# Altium footprint library RBM_ALTIUM_PCB_LIBRARY.PcbLib: 107 footprints (part 5 of 7)
Each footprint in its own frame and in the unit in brackets; x right, y up, seen from the top. Pads: shape width x height; smd on the part's side, far side on the other; paste and mask are expansions set on the pad; w line width, h text height; cw(c..) or ccw(c..) is an arc to the next point about the centre after c.
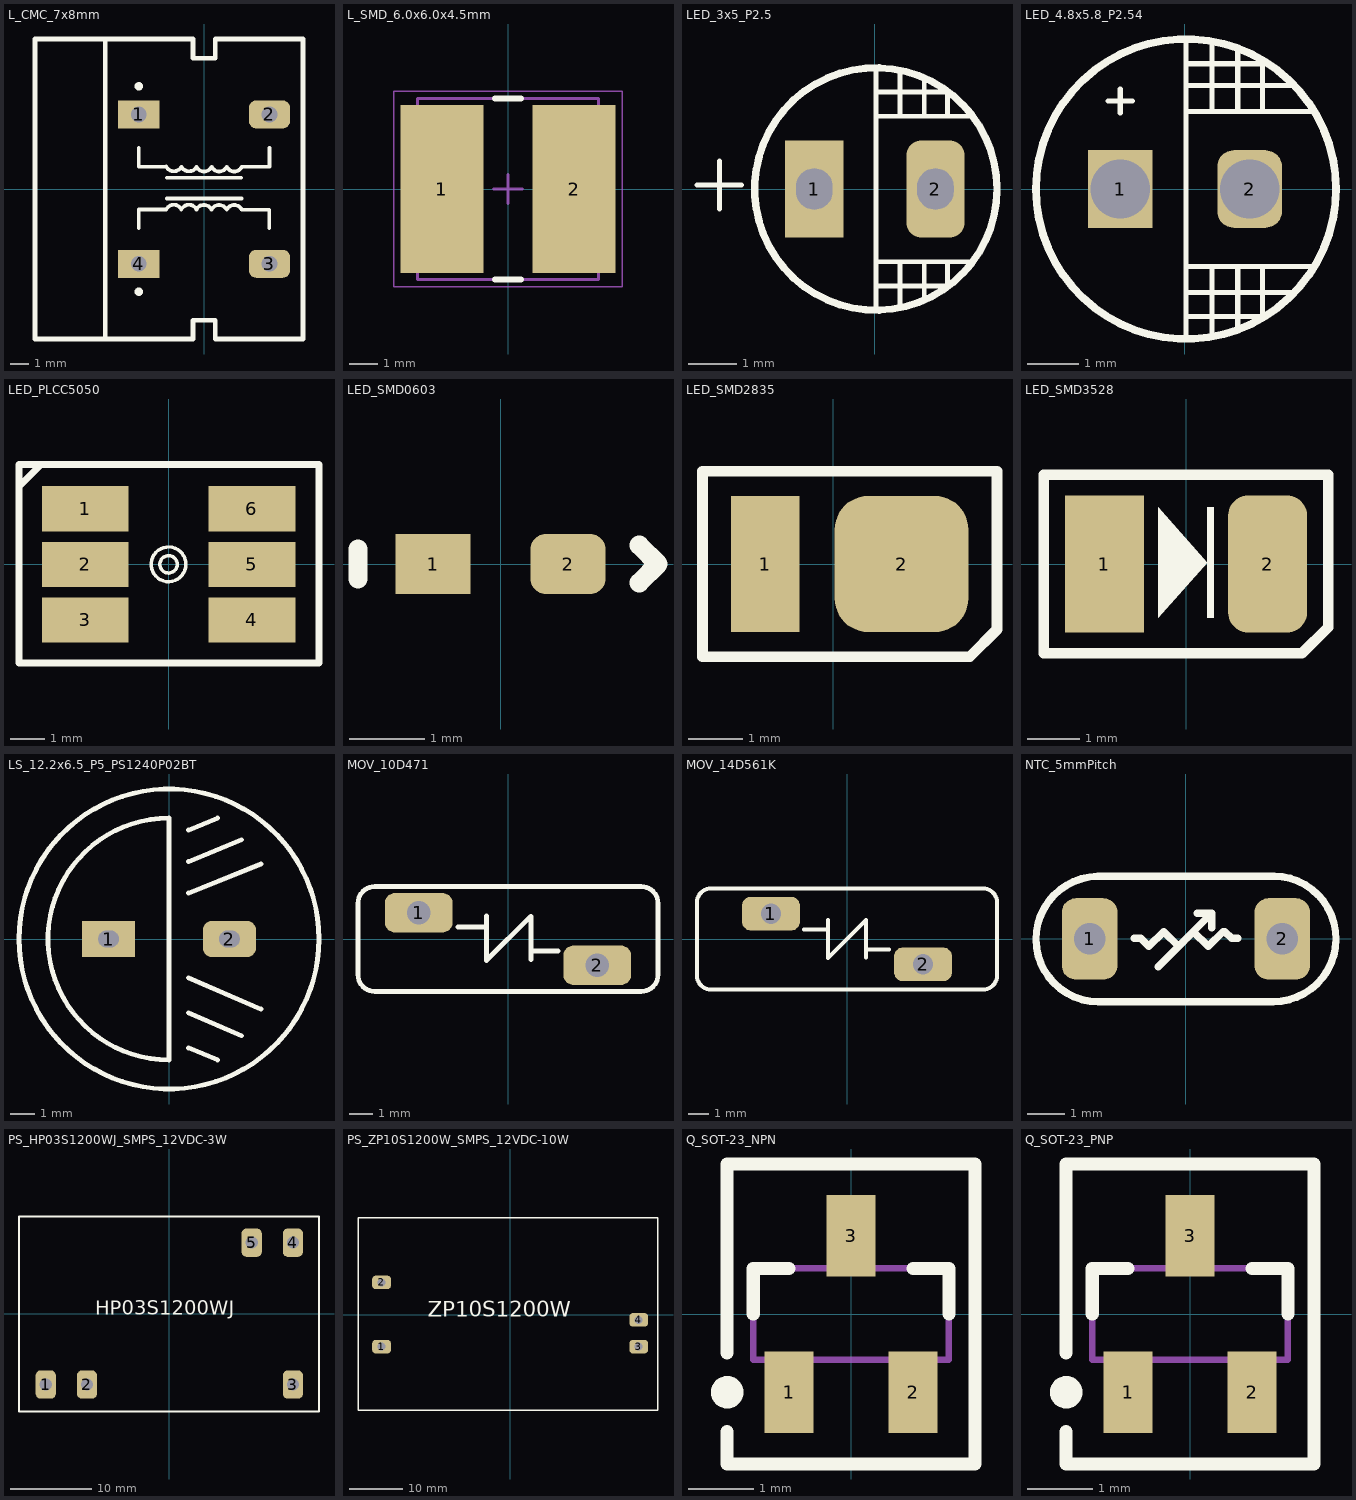
[diagram p4: the footprints below, top view; thin cyan lines are the x and y axes]

## L_CMC_7x8mm [mm] "UU9.8"
pads (4):
  rect 2.2x1.5 hole 0.85: 1(-3.501,3.996) 4(-3.501,-4.004)
  rrect50% 2.2x1.5 hole 0.85: 2(3.499,3.996) 3(3.499,-4.004)
Top Overlay:
  lines w0.2: -3.501,-2.104 -3.501,-1.096 -2.026,-1.096 cw(c-1.622,-1.293) -1.218,-1.099 cw(c-0.814,-1.296) -0.409,-1.101 cw(c-0.006,-1.298) 0.399,-1.104 cw(c0.803,-1.3) 1.208,-1.106 cw(c1.611,-1.303) 2.016,-1.109 3.487,-1.109 3.487,-2.104 ; -3.501,2.196 -3.501,1.189 -2.035,1.189 -2.022,1.201 ccw(c-1.618,1.395) -1.214,1.199 ccw(c-0.809,1.393) -0.406,1.196 ccw(c-0.001,1.391) 0.403,1.194 ccw(c0.808,1.388) 1.211,1.191 ccw(c1.616,1.386) 2.02,1.189 3.487,1.189 3.499,1.201 3.499,2.196 ; -2.006,0.596 1.994,0.596 ; -2.001,-0.504 1.999,-0.504
  lines w0.254: -5.3,-8 -5.3,8 ; -3.401,-5.516 cw(c-3.5,-5.5) -3.4,-5.5 ; -3.401,5.484 cw(c-3.5,5.5) -3.4,5.5 ; -9.06,-8.033 -9.06,8.033 -0.6,8.033 -0.6,7 0.598,7 0.598,8.033 5.3,8.033 5.3,-8.033 0.598,-8.033 0.598,-7.033 -0.6,-7.033 -0.6,-8.033 -9.06,-8.033
3D body "User Library-UF9_8_H-1.step": height 12, standoff -2.5, extent -9.06,-8.033 5.3,8.033

## L_SMD_6.0x6.0x4.5mm [mm] "YNR6045-102M;  1mH ±20% 300mA 4.5O SMD,6.0x6.0x4.5mm Power Inductors RoHS"
height 4.5
pads (2):
  rect 2.9x5.85 smd: 1(-2.3,0) 2(2.3,0)
Top Overlay:
  lines w0.2: -0.45,-3.15 0.45,-3.15 ; -0.45,3.15 0.45,3.15
Assembly Top:
  lines w0.1: -3.15,-3.15 -3.15,3.15 3.15,3.15 3.15,-3.15 -3.15,-3.15
Courtyard Top:
  lines w0.05: -3.975,-3.4 -3.975,3.4 3.975,3.4 3.975,-3.4 -3.975,-3.4
  lines w0.1: -0.5,0 0.5,0 ; 0,-0.5 0,0.5
3D body "INDP6060X45N.step": height 4.6, standoff 0, extent -3.1,-3 3.1,3

## LED_3x5_P2.5 [mm]
pads (2):
  rect 1.2x2 hole 0.85 slot 0.75 at 0 deg: 1(-1.25,0)
  rrect50% 1.2x2 hole 0.85 slot 0.75 at 0 deg: 2(1.25,0)
Top Overlay:
  circle w0.15: c0.02,0 r2.5
  lines w0.1: -3.67,0.083 -2.754,0.083 ; -3.203,-0.417 -3.203,0.583 ; 0.02,-2.5 0.02,2.5 ; 0.02,-2 1.5,-2 1.5,-1.5 ; 0.02,-1.5 2.014,-1.5 ; 0.02,1.5 2.014,1.5 ; 0.02,2 1.5,2 1.5,1.5 ; 0.52,-2.4 0.52,-1.5 ; 0.52,1.5 0.52,2.4 ; 1.02,-2.3 1.02,-1.5 ; 1.02,1.5 1.02,2.3
3D body "LED_3x5_P2.5.STEP": height 7.38, standoff -1.17, extent -1.974,-1.498 2.014,1.994

## LED_4.8x5.8_P2.54 [mm] "HL-798H256WC-MD"
pads (2):
  rect 1.25x1.5 / inner rect 1.5x2.2 / far side rect 1.5x2.2 hole 1.15: 1(-1.25,0)
  rrect50% 1.25x1.5 / inner rrect50% 1.5x2.2 / far side rrect50% 1.5x2.2 hole 1.15: 2(1.25,0)
Top Overlay:
  circle w0.15: c0.02,0 r2.9
  lines w0.1: -1.484,1.7 -1.017,1.7 ; -1.25,1.466 -1.25,1.934 ; 0.02,-2.9 0.02,2.9 ; 0.02,-2 2.1,-2 ; 0.02,-1.5 2.503,-1.5 ; 0.02,1.5 2.502,1.5 ; 0.02,2 2.126,2 ; 0.02,2.423 1.5,2.423 ; 0.039,-2.465 1.5,-2.465 ; 0.52,-2.857 0.52,-1.5 ; 0.52,1.5 0.52,2.857 ; 1.02,-2.722 1.02,-1.5 ; 1.02,1.5 1.02,2.722 ; 1.5,-2.494 1.5,-1.5 ; 1.5,1.5 1.5,2.5
3D body: height 4.8, standoff 0, extent -2.38,-2.4 2.42,2.4
3D body: height 1.5, standoff 0, extent -2.88,-2.897 2.92,2.897
3D body: height 2, standoff 1, extent -1.98,-2 2.02,2
3D body: height 1, standoff -1.5, extent -1.746,-0.499 -0.75,0.499
3D body: height 1, standoff -1.5, extent 0.754,-0.499 1.75,0.499

## LED_PLCC5050 [mm] "EDISON RGB .2W"
pads (6):
  rect 2.5x1.3 smd: 1(-2.4,1.6) 2(-2.4,0) 3(-2.4,-1.6) 4(2.4,-1.6) 5(2.4,0) 6(2.4,1.6)
Top Overlay:
  circle w0.1: c0,0 r0.5
  circle w0.1: c0,0 r0.25
  lines w0.2: -4.305,2.235 -3.67,2.87 ; -4.305,-2.845 4.331,-2.845 4.331,2.87 -4.305,2.87 -4.305,-2.845
3D body "User Library-APA102C.step": height 1.51, standoff -0.04, extent -2.75,-2.5 2.75,2.5

## LED_SMD0603 [mm]
pads (2):
  rect 1x0.8 smd: 1(-0.9,0)
  rrect50% 1x0.8 smd: 2(0.9,0)
Top Overlay:
  lines w0.254: -1.9,-0.2 -1.9,0.2 ; 1.85,-0.25 2.1,0 1.85,0.25
3D body "ALSRobot-LED0603(R).step": height 0.6, standoff 0, extent -0.81,-0.4 0.81,0.4

## LED_SMD2835 [mm]
pads (2):
  rect 1.25x2.5 smd: 1(-1.25,0)
  rrect50% 2.45x2.5 smd: 2(1.25,0)
Top Overlay:
  lines w0.2: -2.4,-1.7 2.5,-1.7 3,-1.2 3,1.7 -2.4,1.7 -2.4,-1.7
3D body "LED_SMD-2835.STEP": height 0.7, standoff -0.02, extent -1.547,-1.4 2.017,1.4

## LED_SMD3528 [mm]
pads (2):
  rect 1.5x2.6 smd: 1(-1.55,0)
  rrect50% 1.5x2.6 smd: 2(1.55,0)
Top Overlay:
  region: 0.525,1.075 0.4,1.075 0.4,-1.025 0.525,-1.025
  region: -0.525,-1.025 -0.525,1.075 0.4,0.025
  region: 2.5,1.6
  lines w0.2: -2.7,-1.7 -2.7,1.7 2.7,1.7 2.7,-1.2 2.2,-1.7 -2.7,-1.7
3D body "LED_Osram_Led_PLCC4-2.step": height 1.95, standoff 0, extent -1.8,-1.4 1.7,1.4

## LS_12.2x6.5_P5_PS1240P02BT [mm] "PS1240P02BT, ø12.2x6.5 P5 70dB 4kHz 3~30V"
pads (2):
  rect 2.2x1.5 hole 0.7 slot 0.85 at 0 deg: 1(-2.5,0)
  rrect50% 2.2x1.5 hole 0.7 slot 0.85 at 0 deg: 2(2.5,0)
Top Overlay:
  circle w0.2: c0,0 r6.2
  lines w0.2: 0.8,-4.5 2,-5 ; 0.8,-3.046 3,-4 ; 0.8,-1.6 3.8,-2.9 ; 0.8,1.9 3.8,3.1 ; 0.8,3.2 3,4.1 ; 0.8,4.5 2,5 ; 0,-5 cw(c0,0) 0,5 0,-5
3D body: height 6.75, standoff 0.25, extent -6.1,-6.097 6.1,6.097
3D body: height 1, standoff -1, extent -2.829,-0.329 -2.171,0.329
3D body: height 1, standoff -1, extent 2.173,-0.329 2.83,0.33
3D body: height 6.8, standoff 0.3, extent -1.494,-1.497 1.494,1.497

## MOV_10D471 [mm]
pads (2):
  rrect50% 2.85x1.65 hole 1: 1(-3.75,1.1) 2(3.75,-1.1)
Top Overlay:
  lines w0.1: 0.998,-0.51 1.009,-0.5
  lines w0.2: -5.1,2.2 5.6,2.2 cw(c5.6,1.5) 6.3,1.5 6.3,-1.5 cw(c5.6,-1.5) 5.6,-2.2 -5.6,-2.2 cw(c-5.6,-1.5) -6.3,-1.5 -6.3,1.5 cw(c-5.6,1.5) -5.6,2.2 -4.9,2.2 ; -2.1,0.499 -0.921,0.499 ; -0.908,0.967 -0.908,-0.903 0.954,0.959 ; 0.967,-0.875 0.967,0.959 ; 1.009,-0.5 2.1,-0.5
3D body "User Library-S10K275.STEP": height 13.55, standoff -1.95, extent -6,-1.9 6,1.901
3D body: height 3, standoff -2, extent -4.158,0.691 -3.342,1.509
3D body: height 3, standoff -2, extent 3.343,-1.509 4.16,-0.691

## MOV_14D561K [mm]
pads (2):
  rrect50% 2.85x1.65 hole 1: 1(-3.75,1.25) 2(3.75,-1.25)
Top Overlay:
  lines w0.1: 0.975,-0.539 0.985,-0.528
  lines w0.2: -2.123,0.471 -0.945,0.471 ; -0.931,0.939 -0.931,-0.931 0.931,0.931 ; 0.944,-0.903 0.944,0.931 ; 0.985,-0.528 2.077,-0.528 ; -7.4,-1.8 ccw(c-6.7,-1.8) -6.7,-2.5 6.7,-2.5 ccw(c6.7,-1.8) 7.4,-1.8 7.4,1.8 ccw(c6.7,1.8) 6.7,2.5 -6.7,2.5 ccw(c-6.7,1.8) -7.4,1.8 -7.4,-1.8
3D body "Varistor_14D561K.STEP": height 17.4, standoff -1.5, extent -7.4,-2.175 7.4,2.175

## NTC_5mmPitch [mm]
pads (2):
  rrect50% 1.5x2.2 hole 0.85: 1(-2.6,0) 2(2.6,0)
Top Overlay:
  lines w0.1: -1.229,0.018 -1.218,0.018 ; 1,0.2 1.049,0.2 ; -0.6,0.2 -0.6,0.2 ; 0.6,-0.2 0.6,-0.2
  lines w0.2: -2.384,1.691 ccw(c-2.353,-0.005) -2.371,-1.7 ; -2.384,1.692 2.38,1.692 ; -2.353,-1.694 2.355,-1.694 ; -1.4,0.018 -1.229,0.018 ; -1.218,0.018 -1,-0.2 -0.6,0.2 -0.2,-0.2 0.2,0.2 0.6,-0.2 1,0.2 ; -0.75,-0.75 0.7,0.7 ; 0.3,0.7 0.7,0.7 ; 0.7,0.3 0.7,0.7 ; 1.049,0.2 1.232,0.018 1.4,0.018 ; 2.347,-1.694 ccw(c2.355,0.002) 2.38,1.698
3D body: height 2, standoff -1, extent -2.874,-0.274 -2.326,0.274
3D body: height 2, standoff -1, extent 2.327,-0.274 2.875,0.275
3D body: height 6.75, standoff 1.25, extent -2.752,-1.638 2.748,1.692
3D body: height 4, standoff 1, extent -2.9,-0.3 -2.302,0.299
3D body: height 4, standoff 1, extent 2.302,-0.299 2.9,0.3

## PS_HP03S1200WJ_SMPS_12VDC-3W [mm]
pads (5):
  rrect50% 2.5x3.5 hole 1.5: 1(-15.24,-8.75) 2(-10.16,-8.75) 3(15.24,-8.75) 4(15.24,8.75) 5(10.16,8.75)
Top Overlay:
  lines w0.254: -18.54,-12.05 -18.54,11.95 18.46,11.95 18.46,-12.05 -18.54,-12.05
  text "HP03S1200WJ" at -9.14,-0.75 h3
Bottom Overlay:
  lines w0.254: -18.54,-12.05 -18.54,11.95 18.46,11.95 18.46,-12.05 -18.54,-12.05
  text "G" at 16.31,4.1 h3
  text "V" at 11.36,4.15 h3
  text "N" at -9.04,-6.05 h3
  text "L" at -14.24,-6.05 h3
3D body: height 6, standoff -4, extent 9.664,8.251 10.66,9.249
3D body: height 15.5, standoff 0, extent -18.54,-12.05 18.36,11.95
3D body: height 6, standoff -4, extent 14.744,8.251 15.74,9.249
3D body: height 6, standoff -4, extent 14.744,-9.249 15.74,-8.251
3D body: height 6, standoff -4, extent -15.736,-9.249 -14.74,-8.251
3D body: height 6, standoff -4, extent -10.656,-9.249 -9.66,-8.251

## PS_ZP10S1200W_SMPS_12VDC-10W [mm]
pads (4):
  rrect50% 3.5x2.5 hole 1.5: 1(-24,-6) 2(-24,6) 3(24,-6) 4(24,-1)
Top Overlay:
  lines w0.254: -28.4,-17.9 -28.4,18.1 27.6,18.1 27.6,-17.9 -28.4,-17.9
  text "ZP10S1200W" at -15.4,-1.4 h5
Bottom Overlay:
  lines w0.254: -28.4,-17.9 -28.4,18.1 27.6,18.1 27.6,-17.9 -28.4,-17.9
  text "-Ve" at 20.3,-1.7 h3
  text "+Ve" at 20.4,-7 h3
  text "N" at -18,5 h3
  text "L" at -17.9,-6.7 h3
3D body: height 25, standoff 0, extent -28.4,-17.9 27.6,18.1
3D body: height 21, standoff -4, extent 23.504,-6.499 24.5,-5.501
3D body: height 21, standoff -4, extent 23.504,-1.499 24.5,-0.501
3D body: height 21, standoff -4, extent -24.496,-6.499 -23.5,-5.501
3D body: height 21, standoff -4, extent -24.496,5.501 -23.5,6.499

## Q_SOT-23_NPN [mm] "NPN 500mA 45V 250mW SOT-23(SOT-23-3)"
height 1.15
pads (3):
  rect 0.75x1.25 smd: 1(-0.95,-1.2) 2(0.95,-1.2) 3(0,1.2)
Top Overlay:
  circle w0.25: c-1.9,-1.2 r0.125
  lines w0.2: -1.9,-1.8 -1.9,-2.3 1.9,-2.3 1.9,2.3 -1.9,2.3 -1.9,-0.6 ; -1.5,0 -1.5,0.7 -0.95,0.7 ; 0.95,0.7 1.5,0.7 1.5,0
Mechanical 13:
  lines w0.1: -1.5,-0.7 1.5,-0.7 1.5,0.7 -1.5,0.7 -1.5,-0.7
3D body "SOT95P245X115-3N.step": height 1.15, standoff 0, extent -1.5,-1.3 1.5,1.3

## Q_SOT-23_PNP [mm] "PNP 500mA -45V 250mW SOT-23(SOT-23-3)"
height 1.15
pads (3):
  rect 0.75x1.25 smd: 1(-0.95,-1.2) 2(0.95,-1.2) 3(0,1.2)
Top Overlay:
  circle w0.25: c-1.9,-1.2 r0.125
  lines w0.2: -1.9,-1.8 -1.9,-2.3 1.9,-2.3 1.9,2.3 -1.9,2.3 -1.9,-0.6 ; -1.5,0 -1.5,0.7 -0.95,0.7 ; 0.95,0.7 1.5,0.7 1.5,0
Mechanical 13:
  lines w0.1: -1.5,-0.7 1.5,-0.7 1.5,0.7 -1.5,0.7 -1.5,-0.7
3D body "SOT95P245X115-3N.step": height 1.15, standoff 0, extent -1.5,-1.3 1.5,1.3